# Altium footprint library zbook-rf-shields-BLE-P1.PcbLib: 34 footprints (part 3 of 3)
Each footprint in its own frame and in the unit in brackets; x right, y up, seen from the top. Pads: shape width x height; smd on the part's side, far side on the other; paste and mask are expansions set on the pad; w line width, h text height; cw(c..) or ccw(c..) is an arc to the next point about the centre after c.
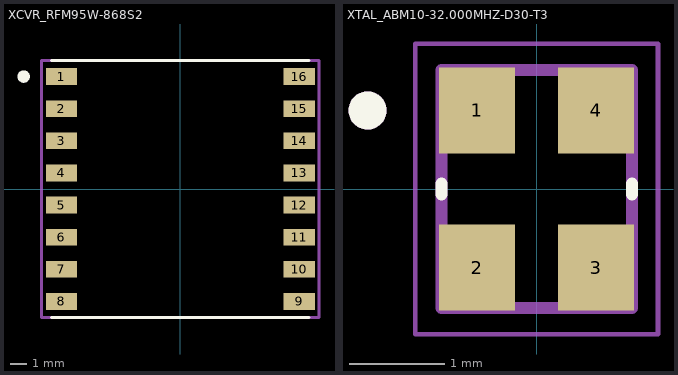
[diagram p2: the footprints below, top view; thin cyan lines are the x and y axes]

## XCVR_RFM95W-868S2 [mm]
pads (16):
  rect 1.95x1.05 smd: 1(-7.4,7) 2(-7.4,5) 3(-7.4,3) 4(-7.4,1) 5(-7.4,-1) 6(-7.4,-3) 7(-7.4,-5) 8(-7.4,-7) 9(7.4,-7) 10(7.4,-5) 11(7.4,-3) 12(7.4,-1) 13(7.4,1) 14(7.4,3) 15(7.4,5) 16(7.4,7)
Top Overlay:
  circle w0.2: c-9.75,7 r0.292
  region: -9.5,6.808 -10.011,6.808 -10.011,7.2 -9.5,7.2
  lines w0.2: -8,-8 8,-8 ; -8,8 8,8
Mechanical 29:
  lines w0.18: -8.635,-8 8.635,-8 ; -8.635,8 8.635,8
  lines w0.2: -8.635,-8 -8.635,8 ; 8.635,-8 8.635,8
3D body "step_temp.STEP": height 1.8, standoff 0, extent -8,-8 8,8

## XTAL_ABM10-32.000MHZ-D30-T3 [mm]
height 0.7
pads (4):
  rect 0.8x0.9 smd: 1(-0.625,0.825) 2(-0.625,-0.825) 3(0.625,-0.825) 4(0.625,0.825)
Top Overlay:
  circle w0.2: c-1.775,0.825 r0.1
  lines w0.127: -1,-0.055 -1,0.055 ; 1,-0.055 1,0.055
Mechanical 13:
  circle w0.2: c-1.775,0.825 r0.1
  lines w0.127: -1,-1.25 1,-1.25 1,1.25 -1,1.25 -1,-1.25
Mechanical 15:
  lines w0.05: -1.275,-1.525 1.275,-1.525 1.275,1.525 -1.275,1.525 -1.275,-1.525
3D body "step_temp.STEP": height 0.7, standoff 0, extent -1.25,-1 1.25,1